# Altium integrated library KSZ8081RNAIA-TR.IntLib: 1 symbol
Pins are listed as number, name and electrical type; pins without a type are passive.

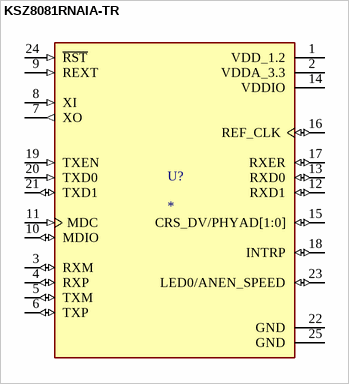
[diagram p0: symbol KSZ8081RNAIA-TR]

## KSZ8081RNAIA-TR
designator U?
1/1 Transceiver Full RMII 24-QFN (4x4); MF: Microchip; MP: KSZ8081RNAIA-TR; SnapEDA_Link: https://www.snapeda.com/parts/KSZ8081RNAIA-TR/Microchip+Technology/view-part/?ref=snap; Package: QFN-24 Microchip; Value: *; Check_prices: https://www.snapeda.com/parts/KSZ8081RNAIA-TR/Microchip+Technology/view-part/?ref=eda
footprint QFN50P400X400X90-25N
pins: 1 VDD_1.2 (power), 2 VDDA_3.3 (power), 3 RXM (io), 4 RXP (io), 5 TXM (io), 6 TXP (io), 7 XO (out), 8 XI (in), 9 REXT (in), 10 MDIO (io), 11 MDC (in), 12 RXD1 (io), 13 RXD0 (io), 14 VDDIO (power), 15 CRS_DV/PHYAD[1:0] (io), 16 REF_CLK (io), 17 RXER (io), 18 INTRP (io), 19 TXEN (in), 20 TXD0 (in), 21 TXD1 (io), 22 GND (power), 23 LED0/ANEN_SPEED (io), 24 ~{RST} (in), 25 GND (power)